# Altium schematic symbol library EEEFN1A220R.SchLib: 1 symbol
Pins are listed as number, name and electrical type; pins without a type are passive.

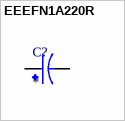
[diagram p0: symbol EEEFN1A220R]

## EEEFN1A220R
designator C?
CAP ALUM 22UF 20% 10V SMD; MP: EEEFN1A220R; MF: Panasonic; SnapEDA_Link: https://www.snapeda.com/parts/EEEFN1A220R/Panasonic/view-part/?ref=snap; Availability: In Stock; Purchase-URL: https://pricing.snapeda.com/search/part/EEEFN1A220R/?ref=eda; Value: *; Price: None; Package: RADIAL-2 Panasonic; Check_prices: https://www.snapeda.com/parts/EEEFN1A220R/Panasonic/view-part/?ref=eda
footprint CAP_EEEFN1A220R
pins: 1, 2